# Altium schematic symbol library TPS65131RGER.SchLib: 1 symbol
Pins are listed as number, name and electrical type; pins without a type are passive.

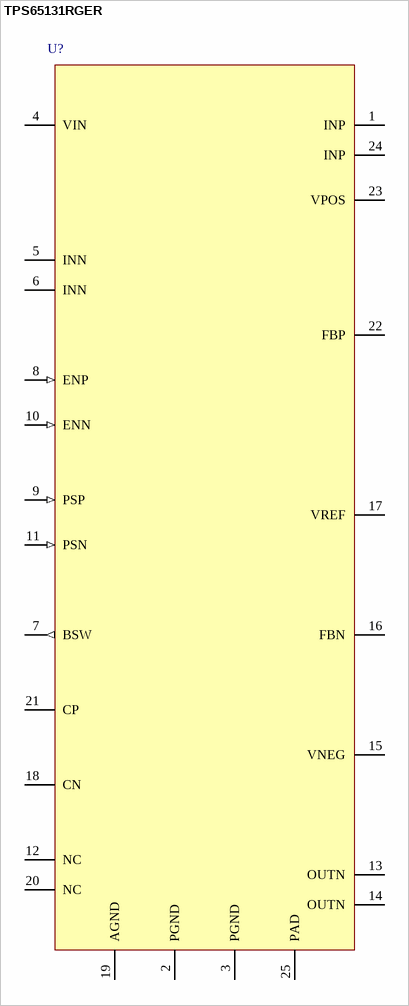
[diagram p0: symbol TPS65131RGER]

## TPS65131RGER
designator U?
Positive and negative output DC-DC converter, 2A switches, 2.7-5.5V input, VQFN-24
pins: 1 INP, 2 PGND (power), 3 PGND (power), 4 VIN (power), 5 INN (power), 6 INN (power), 7 BSW (out), 8 ENP (in), 9 PSP (in), 10 ENN (in), 11 PSN (in), 12 NC, 13 OUTN, 14 OUTN, 15 VNEG, 16 FBN, 17 VREF, 18 CN, 19 AGND (power), 20 NC, 21 CP, 22 FBP, 23 VPOS, 24 INP, 25 PAD (power)